# Altium footprint library FootPrintLib_8.PcbLib: 590 footprints (part 24 of 37)
Each footprint in its own frame and in the unit in brackets; x right, y up, seen from the top. Pads: shape width x height; smd on the part's side, far side on the other; paste and mask are expansions set on the pad; w line width, h text height; cw(c..) or ccw(c..) is an arc to the next point about the centre after c.
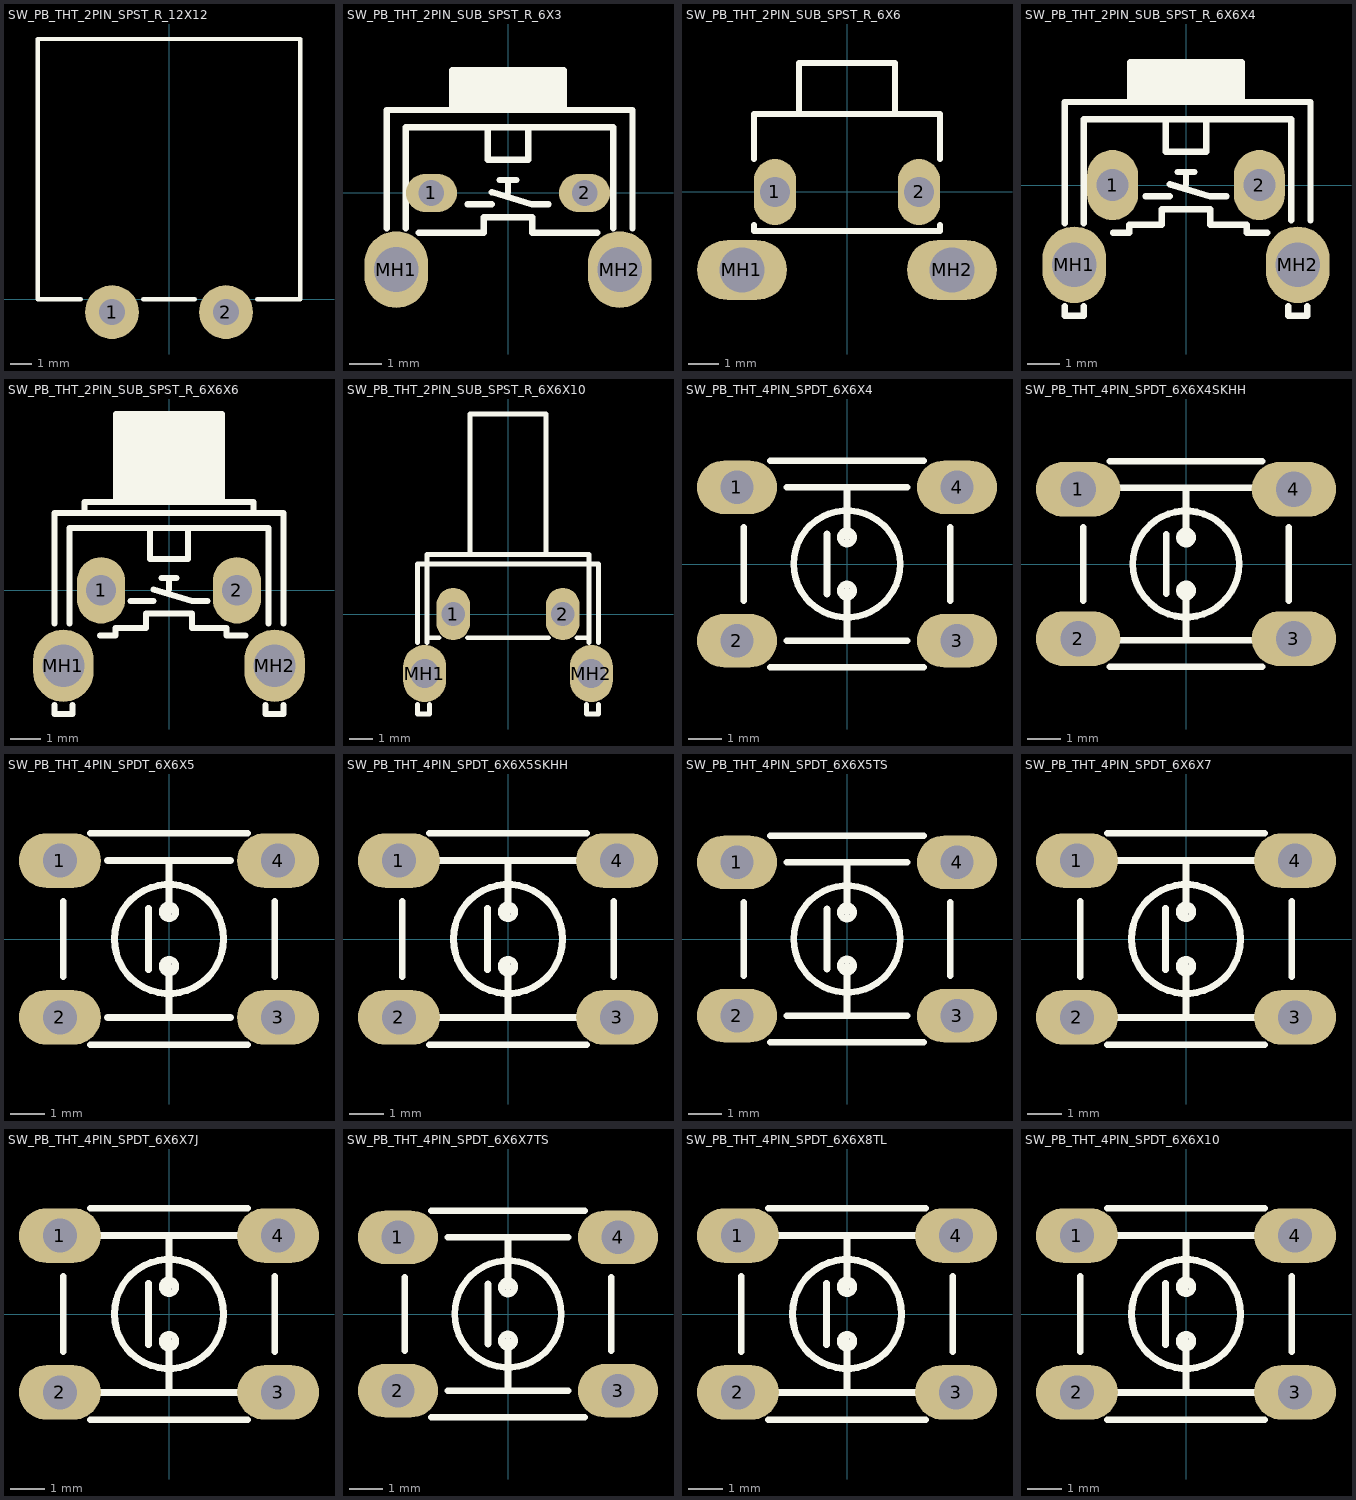
[diagram p23: the footprints below, top view; thin cyan lines are the x and y axes]

## SW_PB_THT_2PIN_SPST_R_12X12 [mm] "SWITCH, PUSHBUTTON, THD, SPST,  12x12x9.1mm"
height 9
pads (2):
  round 2.5 hole 1.2 mask+0.1: 1(-2.65,-0.6) 2(2.65,-0.6)
Top Overlay:
  lines w0.2: -4.1,0 -6.1,0 -6.1,12.1 6.1,12.1 6.1,0 4.1,0 ; -1.2,0 1.2,0
3D body: height 3.85, standoff -1.85, extent 2.15,-0.8 3.15,-0.4
3D body: height 3.9, standoff 3.5, extent 2.15,-0.8 3.15,0
3D body: height 3.9, standoff 3.5, extent -3.15,-0.8 -2.15,0
3D body: height 3.85, standoff -1.85, extent -3.15,-0.8 -2.15,-0.4
3D body: height 6.5, standoff 0, extent -6,0 6,12
3D body: height 9.1, standoff 0, extent -2.7,3.3 2.7,8.7

## SW_PB_THT_2PIN_SUB_SPST_R_6X3 [mm] "SWITCH, PUSHBUTTON, THD, SPST, 6X3mm;"
height 7.4
pads (4):
  oval 1.6x1.2 hole 0.8 mask+0.1: 1(-2.4,0) 2(2.4,0)
  oval 2x2.4 hole 1.4 mask+0.1: MH1(-3.5,-2.4) MH2(3.5,-2.4)
Top Overlay:
  region: 1.75,3.85 -1.75,3.85 -1.75,2.6 1.75,2.6
  lines w0.2: -3.8,-1.1 -3.8,2.6 3.9,2.6 3.9,-1.1 ; -3.2,-1.1 -3.2,2.057 -0.635,2.057 ; -2.8,-1.245 -0.762,-1.245 -0.762,-0.762 0.762,-0.762 0.762,-1.245 2.8,-1.245 ; -1.75,2.6 -1.75,3.85 1.75,3.85 1.75,2.6 ; -1.27,-0.356 -0.508,-0.356 ; -0.508,0.025 0.762,-0.356 1.27,-0.356 ; -0.254,0.406 0,0.406 ; 0,0.025 0,0.406 ; 0.254,0.406 0,0.406 ; 3.3,-1.1 3.3,2.057 0.635,2.057 ; -0.635,2.057 0.635,2.057 ; -0.635,2.057 -0.635,1.041 0.635,1.041 0.635,2.057
3D body "43411.stp": height 4.4, standoff -2.5, extent -4.19,-3.228 4.19,3.908

## SW_PB_THT_2PIN_SUB_SPST_R_6X6 [mm] "SWITCH, PUSHBUTTON, THD, SPST, 6X6mm, RIGHT ANGLE, FSMRA2JH, FSMRA3JH, SKHHLQA010"
pads (4):
  oval 1.4x2.2 hole 1 mask+0.1: 1(-2.4,0) 2(2.4,0)
  oval 3x2 hole 1.5 mask+0.1: MH1(-3.5,-2.6) MH2(3.5,-2.6)
Top Overlay:
  lines w0.2: -3.1,-1.1 -3.1,-1.3 3.1,-1.3 3.1,-1.1 ; -3.1,1.1 -3.1,2.6 3.1,2.6 3.1,1.1 ; -1.6,2.6 -1.6,4.3 1.6,4.3 1.6,2.6
3D body "User Library-TL1105 Tactile Switch 6x6 mm rightAngle.step": height 7.2, standoff -3.4, extent -4.11,-4.05 4.109,4.25

## SW_PB_THT_2PIN_SUB_SPST_R_6X6X4 [mm] "SWITCH, PUSHBUTTON, THD, SPST, 6X6X3.85 mm; 1,000,000 cycles ; 0.98N Force, SKHHLMA010"
height 7.4
pads (4):
  oval 1.6x2.2 hole 1 mask+0.1: 1(-2.3,0) 2(2.3,0)
  oval 2x2.4 hole 1.4 mask+0.1: MH1(-3.5,-2.5) MH2(3.5,-2.5)
Top Overlay:
  region: 1.75,3.85 -1.75,3.85 -1.75,2.6 1.75,2.6
  lines w0.2: -3.8,-3.8 -3.8,-4.1 -3.2,-4.1 -3.2,-3.8 ; -3.8,-1.2 -3.8,2.6 3.9,2.6 3.9,-1.1 ; -3.2,-1.2 -3.2,2.057 -0.635,2.057 ; -2.286,-1.499 -1.778,-1.499 -1.778,-1.245 -0.762,-1.245 -0.762,-0.762 0.762,-0.762 0.762,-1.245 1.905,-1.245 1.905,-1.499 2.54,-1.499 ; -1.75,2.6 -1.75,3.85 1.75,3.85 1.75,2.6 ; -1.27,-0.356 -0.508,-0.356 ; -0.508,0.025 0.762,-0.356 1.27,-0.356 ; -0.254,0.406 0,0.406 ; 0,0.025 0,0.406 ; 0.254,0.406 0,0.406 ; 3.2,-3.8 3.2,-4.1 3.8,-4.1 3.8,-3.8 ; 3.3,-1.1 3.3,2.057 0.635,2.057 ; -0.635,2.057 -0.635,1.041 0.635,1.041 0.635,2.057 ; -0.635,2.057 0.635,2.057
3D body "SKHHLM.STEP": height 7.43, standoff -3.47, extent -4.248,-4.042 4.248,3.858

## SW_PB_THT_2PIN_SUB_SPST_R_6X6X6 [mm] "SWITCH, PUSHBUTTON, THD, SPST, 6X6X5.85mm; 1,000,000 cycles ; 0.98N Force, SKHHLUA010"
height 7.4
pads (4):
  oval 1.6x2.2 hole 1 mask+0.1: 1(-2.25,0) 2(2.25,0)
  oval 2x2.4 hole 1.4 mask+0.1: MH1(-3.5,-2.5) MH2(3.5,-2.5)
Top Overlay:
  region: 1.75,5.842 -1.75,5.842 -1.75,2.921 1.75,2.921
  lines w0.2: -3.8,-3.8 -3.8,-4.1 -3.2,-4.1 -3.2,-3.8 ; -3.8,-1.1 -3.8,2.565 -2.794,2.565 ; -3.3,-1.1 -3.3,2.057 -0.635,2.057 ; -2.286,-1.499 -1.778,-1.499 -1.778,-1.245 -0.762,-1.245 -0.762,-0.762 0.762,-0.762 0.762,-1.245 1.905,-1.245 1.905,-1.499 2.54,-1.499 ; -1.27,-0.356 -0.508,-0.356 ; -0.508,0.025 0.762,-0.356 1.27,-0.356 ; -0.254,0.406 0,0.406 ; 0,0.025 0,0.406 ; 0.254,0.406 0,0.406 ; 2.794,2.565 2.794,2.921 1.75,2.921 ; 3.2,-3.8 3.2,-4.1 3.8,-4.1 3.8,-3.8 ; 3.3,-1.1 3.3,2.057 0.635,2.057 ; 3.8,-1.1 3.8,2.565 -2.794,2.565 ; -2.794,2.565 -2.794,2.921 -1.75,2.921 ; -1.75,2.921 1.75,2.921 ; -1.75,2.921 -1.75,5.842 1.75,5.842 1.75,2.921 ; -0.635,2.057 0.635,2.057 ; -0.635,2.057 -0.635,1.041 0.635,1.041 0.635,2.057
3D body "SKHHLU.STEP": height 7.43, standoff -3.47, extent -4.248,-4.042 4.248,5.858

## SW_PB_THT_2PIN_SUB_SPST_R_6X6X10 [mm] "SWITCH, PUSHBUTTON, THD, SPST, 6X6mm, RIGHT ANGLE"
height 4
pads (4):
  oval 1.4x2.2 hole 1 mask+0.1: 1(-2.3,0) 2(2.3,0)
  oval 1.8x2.4 hole 1.2 mask+0.1: MH1(-3.5,-2.5) MH2(3.5,-2.5)
Top Overlay:
  lines w0.2: -3.8,-3.8 -3.8,-4.2 -3.3,-4.2 -3.3,-3.8 ; -3.8,-1.2 -3.8,2.1 -3.4,2.1 3.4,2.1 3.8,2.1 3.8,-1.2 ; -3.4,-1.2 -3.4,2.5 3.4,2.5 3.4,-1.2 ; -3.4,-1 -2.9,-1 ; -1.7,-1 1.7,-1 ; -1.6,2.5 -1.6,8.4 1.6,8.4 1.6,2.5 ; 2.9,-1 3.4,-1 ; 3.3,-3.8 3.3,-4.2 3.8,-4.2 3.8,-3.8
3D body "User Library-SWITCH, TACTILE, RIGHT ANGLE, 12VDC, 50MA, 8_35MM ACTUATOR, WEALTH METAL TC-0240Z.step": height 7, standoff -4, extent -3.7,-4.15 3.7,8.35

## SW_PB_THT_4PIN_SPDT_6X6X4 [mm] "SWITCH, PUSHBUTTON, THD, SPDT, TS-1143"
height 4.318
pads (4):
  oval 2.4x1.6 hole 1 mask+0.1: 1(-3.3,2.3) 2(-3.3,-2.3) 3(3.3,-2.3) 4(3.3,2.3)
Top Overlay:
  circle w0.2: c0,0 r1.6
  circle w0.2: c0,0.8 r0.2
  circle w0.2: c0,-0.8 r0.2
  lines w0.2: -3.1,-1.1 -3.1,1.1 ; -2.3,-3.1 2.3,-3.1 ; -2.3,3.1 2.3,3.1 ; -1.8,-2.3 1.8,-2.3 ; -1.8,2.3 1.8,2.3 ; -0.6,-0.9 -0.6,0.9 ; 0,-2.3 0,-0.8 ; 0,0.8 0,2.3 ; 3.1,-1.1 3.1,1.1
3D body "TS-1143-WP.stp": height 4.3, standoff -3.5, extent -4.134,-3.25 4.134,3.25

## SW_PB_THT_4PIN_SPDT_6X6X4SKHH [mm] "SWITCH, PUSHBUTTON, THD, SPDT, 6X6X4.3 mm Height ; 1,000,000 cycles ; 0.98N Force, SKHHAJA010"
height 4.3
pads (4):
  oval 2.54x1.651 hole 1.067 mask+0.1: 1(-3.25,2.25) 2(-3.25,-2.25) 3(3.25,-2.25) 4(3.25,2.25)
Top Overlay:
  circle w0.2: c0,-0.8 r0.2
  circle w0.2: c0,0.8 r0.2
  circle w0.2: c0,0 r1.6
  lines w0.2: -3.1,-1.1 -3.1,1.1 ; -2.3,-3.1 2.3,-3.1 ; -2.3,3.1 2.3,3.1 ; -2,-2.3 2,-2.3 ; -2,2.3 2,2.3 ; -0.6,-0.9 -0.6,0.9 ; 0,-2.3 0,-0.8 ; 0,0.8 0,2.3 ; 3.1,-1.1 3.1,1.1
3D body "SKHHAJ.STEP": height 4.33, standoff -3.47, extent -3.95,-3.1 3.95,3.1

## SW_PB_THT_4PIN_SPDT_6X6X5 [mm] "SWITCH, PUSHBUTTON, THD, SPDT, 6X6mm"
pads (4):
  oval 2.4x1.6 hole 1 mask+0.1: 1(-3.2,2.3) 2(-3.2,-2.3) 3(3.2,-2.3) 4(3.2,2.3)
Top Overlay:
  circle w0.2: c0,-0.8 r0.2
  circle w0.2: c0,0.8 r0.2
  circle w0.2: c0,0 r1.6
  lines w0.2: -3.1,-1.1 -3.1,1.1 ; -2.3,-3.1 2.3,-3.1 ; -2.3,3.1 2.3,3.1 ; -1.8,-2.3 1.8,-2.3 ; -1.8,2.3 1.8,2.3 ; -0.6,-0.9 -0.6,0.9 ; 0,-2.3 0,-0.8 ; 0,0.8 0,2.3 ; 3.1,-1.1 3.1,1.1
3D body "Tactile switch 6x6x5mm.step": height 5.01, standoff -3.51, extent -3.872,-3.015 3.871,3.015

## SW_PB_THT_4PIN_SPDT_6X6X5SKHH [mm] "SWITCH, PUSHBUTTON, THD, SPDT, 6X6X5.0 mm Height ; 1,000,000 cycles ; 0.98N Force, SKHHAKA010"
height 5
pads (4):
  oval 2.4x1.6 hole 1 mask+0.1: 1(-3.2,2.3) 2(-3.2,-2.3) 3(3.2,-2.3) 4(3.2,2.3)
Top Overlay:
  circle w0.2: c0,-0.8 r0.2
  circle w0.2: c0,0.8 r0.2
  circle w0.2: c0,0 r1.6
  lines w0.2: -3.1,-1.1 -3.1,1.1 ; -2.3,-3.1 2.3,-3.1 ; -2.3,3.1 2.3,3.1 ; -2,-2.3 2,-2.3 ; -2,2.3 2,2.3 ; -0.6,-0.9 -0.6,0.9 ; 0,-2.3 0,-0.8 ; 0,0.8 0,2.3 ; 3.1,-1.1 3.1,1.1
3D body "SKHHAK.STEP": height 5.03, standoff -3.47, extent -3.95,-3.1 3.95,3.1

## SW_PB_THT_4PIN_SPDT_6X6X5TS [mm] "SWITCH, PUSHBUTTON, THD, SPDT, TS-1150"
height 5.18
pads (4):
  oval 2.4x1.6 hole 1 mask+0.1: 1(-3.3,2.3) 2(-3.3,-2.3) 3(3.3,-2.3) 4(3.3,2.3)
Top Overlay:
  circle w0.2: c0,-0.8 r0.2
  circle w0.2: c0,0.8 r0.2
  circle w0.2: c0,0 r1.6
  lines w0.2: -3.1,-1.1 -3.1,1.1 ; -2.3,-3.1 2.3,-3.1 ; -2.3,3.1 2.3,3.1 ; -1.8,-2.3 1.8,-2.3 ; -1.8,2.3 1.8,2.3 ; -0.6,-0.9 -0.6,0.9 ; 0,-2.3 0,-0.8 ; 0,0.8 0,2.3 ; 3.1,-1.1 3.1,1.1
3D body "TS-1150-WP.stp": height 5, standoff -3.5, extent -4.134,-3.25 4.134,3.25

## SW_PB_THT_4PIN_SPDT_6X6X7 [mm] "SWITCH, PUSHBUTTON, THD, SPDT, 6X6X7.0 mm Height ; 1,000,000 cycles ; 0.98N Force, SKHHBVA010"
height 7
pads (4):
  oval 2.4x1.6 hole 1 mask+0.1: 1(-3.2,2.3) 2(-3.2,-2.3) 3(3.2,-2.3) 4(3.2,2.3)
Top Overlay:
  circle w0.2: c0,-0.8 r0.2
  circle w0.2: c0,0.8 r0.2
  circle w0.2: c0,0 r1.6
  lines w0.2: -3.1,-1.1 -3.1,1.1 ; -2.3,-3.1 2.3,-3.1 ; -2.3,3.1 2.3,3.1 ; -2,-2.3 2,-2.3 ; -2,2.3 2,2.3 ; -0.6,-0.9 -0.6,0.9 ; 0,-2.3 0,-0.8 ; 0,0.8 0,2.3 ; 3.1,-1.1 3.1,1.1
3D body "SKHHBV.STEP": height 7.03, standoff -3.47, extent -3.95,-3.1 3.95,3.1

## SW_PB_THT_4PIN_SPDT_6X6X7J [mm] "SWITCH, PUSHBUTTON, THD, SPDT, Joint Stem type; 7.3 mm Height ; 1,000,000 cycles ; 0.98N Force, SKHHCWA010"
height 7.3
pads (4):
  oval 2.4x1.6 hole 1 mask+0.1: 1(-3.2,2.3) 2(-3.2,-2.3) 3(3.2,-2.3) 4(3.2,2.3)
Top Overlay:
  circle w0.2: c0,-0.8 r0.2
  circle w0.2: c0,0.8 r0.2
  circle w0.2: c0,0 r1.6
  lines w0.2: -3.1,-1.1 -3.1,1.1 ; -2.3,-3.1 2.3,-3.1 ; -2.3,3.1 2.3,3.1 ; -2,-2.3 2,-2.3 ; -2,2.3 2,2.3 ; -0.6,-0.9 -0.6,0.9 ; 0,-2.3 0,-0.8 ; 0,0.8 0,2.3 ; 3.1,-1.1 3.1,1.1
3D body "SKHHCW.STEP": height 7.33, standoff -3.47, extent -3.95,-3.1 3.95,3.1

## SW_PB_THT_4PIN_SPDT_6X6X7TS [mm] "SWITCH, PUSHBUTTON, THD, SPDT, TS-1170"
height 6.985
pads (4):
  oval 2.4x1.6 hole 1 mask+0.1: 1(-3.3,2.3) 2(-3.3,-2.3) 3(3.3,-2.3) 4(3.3,2.3)
Top Overlay:
  circle w0.2: c0,0 r1.6
  circle w0.2: c0,0.8 r0.2
  circle w0.2: c0,-0.8 r0.2
  lines w0.2: -3.1,-1.1 -3.1,1.1 ; -2.3,-3.1 2.3,-3.1 ; -2.3,3.1 2.3,3.1 ; -1.8,-2.3 1.8,-2.3 ; -1.8,2.3 1.8,2.3 ; -0.6,-0.9 -0.6,0.9 ; 0,-2.3 0,-0.8 ; 0,0.8 0,2.3 ; 3.1,-1.1 3.1,1.1
3D body "TS-1170-WP.stp": height 7, standoff -3.5, extent -4.134,-3.25 4.134,3.25

## SW_PB_THT_4PIN_SPDT_6X6X8TL [mm] "SWITCH, PUSHBUTTON, THD, SPDT, 8.0mm, TL-1105-C"
height 8
pads (4):
  oval 2.4x1.6 hole 1 mask+0.1: 1(-3.2,2.3) 2(-3.2,-2.3) 3(3.2,-2.3) 4(3.2,2.3)
Top Overlay:
  circle w0.2: c0,-0.8 r0.2
  circle w0.2: c0,0.8 r0.2
  circle w0.2: c0,0 r1.6
  lines w0.2: -3.1,-1.1 -3.1,1.1 ; -2.3,-3.1 2.3,-3.1 ; -2.3,3.1 2.3,3.1 ; -2,-2.3 2,-2.3 ; -2,2.3 2,2.3 ; -0.6,-0.9 -0.6,0.9 ; 0,-2.3 0,-0.8 ; 0,0.8 0,2.3 ; 3.1,-1.1 3.1,1.1
3D body "TACT_SWITCH_TL-1105-C.STEP": height 8, standoff -3.5, extent -3.95,-3 3.95,3

## SW_PB_THT_4PIN_SPDT_6X6X10 [mm] "SWITCH, PUSHBUTTON, THD, SPDT,"
pads (4):
  oval 2.4x1.6 hole 1 mask+0.1: 1(-3.2,2.3) 2(-3.2,-2.3) 3(3.2,-2.3) 4(3.2,2.3)
Top Overlay:
  circle w0.2: c0,-0.8 r0.2
  circle w0.2: c0,0.8 r0.2
  circle w0.2: c0,0 r1.6
  lines w0.2: -3.1,-1.1 -3.1,1.1 ; -2.3,-3.1 2.3,-3.1 ; -2.3,3.1 2.3,3.1 ; -2,-2.3 2,-2.3 ; -2,2.3 2,2.3 ; -0.6,-0.9 -0.6,0.9 ; 0,-2.3 0,-0.8 ; 0,0.8 0,2.3 ; 3.1,-1.1 3.1,1.1
3D body "SW3dPS-Panasonic-EVQPA-Pushbutton.STEP": height 9.5, standoff -3.5, extent -4.106,-3 4.106,3